# Altium footprint library FootPrintLib_8.PcbLib: 590 footprints (part 25 of 37)
Each footprint in its own frame and in the unit in brackets; x right, y up, seen from the top. Pads: shape width x height; smd on the part's side, far side on the other; paste and mask are expansions set on the pad; w line width, h text height; cw(c..) or ccw(c..) is an arc to the next point about the centre after c.
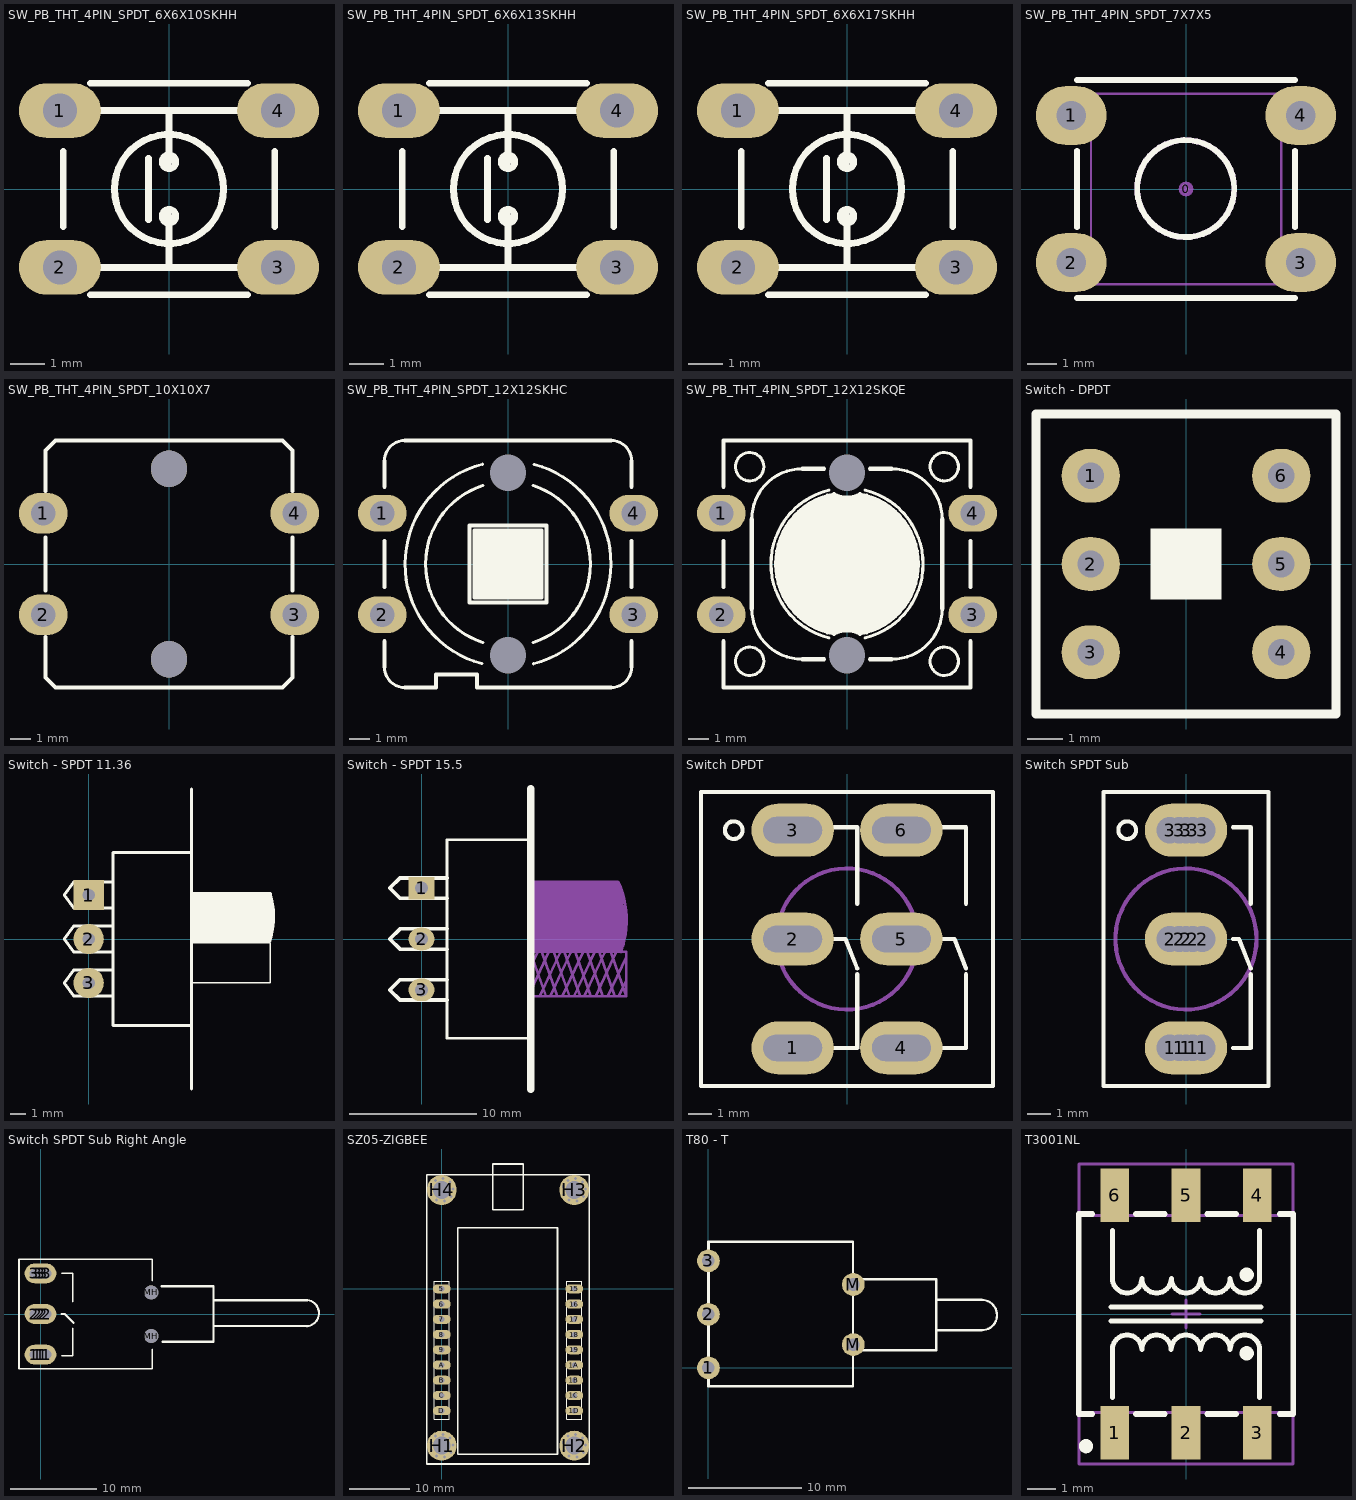
[diagram p24: the footprints below, top view; thin cyan lines are the x and y axes]

## SW_PB_THT_4PIN_SPDT_6X6X10SKHH [mm] "SWITCH, PUSHBUTTON, THD, SPDT, 6X6X9.5 mm Height ; 1,000,000 cycles ; 0.98N Force, SKHHANA010"
height 9.5
pads (4):
  oval 2.4x1.6 hole 1 mask+0.1: 1(-3.2,2.3) 2(-3.2,-2.3) 3(3.2,-2.3) 4(3.2,2.3)
Top Overlay:
  circle w0.2: c0,-0.8 r0.2
  circle w0.2: c0,0.8 r0.2
  circle w0.2: c0,0 r1.6
  lines w0.2: -3.1,-1.1 -3.1,1.1 ; -2.3,-3.1 2.3,-3.1 ; -2.3,3.1 2.3,3.1 ; -2,-2.3 2,-2.3 ; -2,2.3 2,2.3 ; -0.6,-0.9 -0.6,0.9 ; 0,-2.3 0,-0.8 ; 0,0.8 0,2.3 ; 3.1,-1.1 3.1,1.1
3D body "SKHHAN.STEP": height 9.53, standoff -3.47, extent -3.95,-3.1 3.95,3.1

## SW_PB_THT_4PIN_SPDT_6X6X13SKHH [mm] "SWITCH, PUSHBUTTON, THD, SPDT, 6X6X13.0 mm Height; 1,000,000 cycles ; 0.98N Force, SKHHDTA010"
height 13
pads (4):
  oval 2.4x1.6 hole 1 mask+0.1: 1(-3.2,2.3) 2(-3.2,-2.3) 3(3.2,-2.3) 4(3.2,2.3)
Top Overlay:
  circle w0.2: c0,0 r1.6
  circle w0.2: c0,0.8 r0.2
  circle w0.2: c0,-0.8 r0.2
  lines w0.2: -3.1,-1.1 -3.1,1.1 ; -2.3,-3.1 2.3,-3.1 ; -2.3,3.1 2.3,3.1 ; -2,-2.3 2,-2.3 ; -2,2.3 2,2.3 ; -0.6,-0.9 -0.6,0.9 ; 0,-2.3 0,-0.8 ; 0,0.8 0,2.3 ; 3.1,-1.1 3.1,1.1
3D body "SKHHDT.STEP": height 13.03, standoff -3.47, extent -3.95,-3.1 3.95,3.1

## SW_PB_THT_4PIN_SPDT_6X6X17SKHH [mm] "SWITCH, PUSHBUTTON, THD, SPDT, 6X6X17.0 mm Height ; 500,000 cycles ; 0.98N Force, SKHHDHA010"
height 17
pads (4):
  oval 2.4x1.6 hole 1 mask+0.1: 1(-3.2,2.3) 2(-3.2,-2.3) 3(3.2,-2.3) 4(3.2,2.3)
Top Overlay:
  circle w0.2: c0,0 r1.6
  circle w0.2: c0,0.8 r0.2
  circle w0.2: c0,-0.8 r0.2
  lines w0.2: -3.1,-1.1 -3.1,1.1 ; -2.3,-3.1 2.3,-3.1 ; -2.3,3.1 2.3,3.1 ; -2,-2.3 2,-2.3 ; -2,2.3 2,2.3 ; -0.6,-0.9 -0.6,0.9 ; 0,-2.3 0,-0.8 ; 0,0.8 0,2.3 ; 3.1,-1.1 3.1,1.1
3D body "SKHHDH.STEP": height 17.03, standoff -3.47, extent -3.95,-3.1 3.95,3.1

## SW_PB_THT_4PIN_SPDT_7X7X5 [mm] "SWITCH, PUSHBUTTON, THD, SPDT, 7.2X7.2mm, TC-37XB"
height 5
pads (5):
  round 0.508 on Mech15 mask+0.1: 0(0,0)
  oval 2.4x2 hole 1 mask+0.1: 1(-3.9,2.5) 2(-3.9,-2.5) 3(3.9,-2.5) 4(3.9,2.5)
Top Overlay:
  circle w0.2: c-0.011,0.014 r1.65
  lines w0.2: -3.7,-3.7 3.7,-3.7 ; -3.7,-1.3 -3.7,1.3 ; -3.7,3.7 3.7,3.7 ; 3.7,-1.3 3.7,1.3
Mechanical 13:
  circle w0.2: c-0.011,0.014 r1.65
  lines w0.076: -3.232,-3.237 -3.232,3.24 3.24,3.24 3.24,-3.237 -3.232,-3.237
3D body "TC-37XB.stp": height 5, standoff -3.9, extent -4.456,-3.6 4.456,3.6

## SW_PB_THT_4PIN_SPDT_10X10X7 [mm] "SWITCH, PUSHBUTTON, THD, SPDT,"
pads (6):
  oval 2.4x2 hole 1.2 mask+0.1: 1(-6.2,2.5) 2(-6.2,-2.5) 3(6.2,-2.5) 4(6.2,2.5)
  round 1.8 hole 1.8 unplated: ""(0,-4.7) ""(0,4.7)
Top Overlay:
  lines w0.2: -6.1,-3.6 -6.1,-5.6 -5.6,-6.1 5.6,-6.1 6.1,-5.6 6.1,-3.6 ; -6.1,-1.3 -6.1,1.3 ; -6.1,3.6 -6.1,5.6 -5.6,6.1 5.6,6.1 6.1,5.6 6.1,3.6 ; 6.1,-1.3 6.1,1.3
3D body "User Library-SWT9-1.STEP": height 7.3, standoff -3.5, extent -6.5,-6 6.5,6

## SW_PB_THT_4PIN_SPDT_12X12SKHC [mm] "SWITCH, PUSHBUTTON, THD, SPDT, 12X12X7.3 mm ; 1,000,000 cycles ; 1.27N Force, SKHCBEA010"
height 7.3
pads (6):
  oval 2.4x1.8 hole 1.2 mask+0.1: 1(-6.2,2.5) 2(-6.2,-2.5) 3(6.2,-2.5) 4(6.2,2.5)
  round 0 hole 1.8 unplated mask+0.1: ""(0,-4.5) ""(0,4.5)
Top Overlay:
  region: -1.651,-1.651 -1.651,1.651 1.651,1.651 1.651,-1.651
  lines w0.152: -6.096,-5.08 ccw(c-5.08,-5.08) -5.08,-6.096 ; -6.096,5.08 cw(c-5.08,5.08) -5.08,6.096 ; -1.293,-4.913 cw(c0,0) -1.262,4.921 ; -1.248,-3.868 cw(c0,0) -1.248,3.868 ; 1.248,-3.868 ccw(c0,0) 1.248,3.868 ; 1.262,-4.921 ccw(c0,0) 1.293,4.913 ; 5.08,-6.096 ccw(c5.08,-5.08) 6.096,-5.08 ; 5.08,6.096 cw(c5.08,5.08) 6.096,5.08
  lines w0.2: -6.096,-5.08 -6.096,-3.81 ; -6.096,-1.143 -6.096,1.143 ; -6.096,3.81 -6.096,5.08 ; -5.08,-6.096 -3.556,-6.096 -3.556,-5.461 -1.524,-5.461 -1.524,-6.096 5.08,-6.096 ; -5.08,6.096 5.08,6.096 ; 6.096,-5.08 6.096,-3.81 ; 6.096,-1.143 6.096,1.143 ; 6.096,3.81 6.096,5.08 ; -1.905,-1.905 -1.905,1.905 1.905,1.905 1.905,-1.905 -1.905,-1.905 ; -1.651,-1.651 -1.651,1.651 1.651,1.651 1.651,-1.651 -1.651,-1.651
3D body "SKHCBJ.STEP": height 7.33, standoff -3.47, extent -7,-6 7,6

## SW_PB_THT_4PIN_SPDT_12X12SKQE [mm] "SWITCH, PUSHBUTTON, THD, SPDT, 12X12X4.3 mm ; 10,000,000 cycles ; 1.57N Force, SKQEABA010"
height 4.3
pads (6):
  oval 2.4x1.8 hole 1.2 mask+0.1: 1(-6.2,2.5) 2(-6.2,-2.5) 3(6.2,-2.5) 4(6.2,2.5)
  round 0 hole 1.8 unplated mask+0.1: ""(0,-4.5) ""(0,4.5)
Top Overlay:
  circle w0.152: c4.8,-4.8 r0.7
  circle w0.152: c-4.8,-4.8 r0.7
  circle w0.152: c-4.8,4.8 r0.7
  circle w0.152: c4.8,4.8 r0.7
  region: -0.637,-3.441 -0.876,-3.397 -1.338,-3.243 -1.774,-3.027 -2.175,-2.753 -2.535,-2.425 -2.846,-2.051 -3.103,-1.638 -3.299,-1.193 -3.433,-0.725 -3.5,-0.243 -3.5,0.243 -3.433,0.725 -3.299,1.193 -3.103,1.638 -2.846,2.051 -2.535,2.425 -2.175,2.753 -1.774,3.027 -1.338,3.243 -0.876,3.397 -0.637,3.441 -0.488,3.365 -0.167,3.276 0.167,3.276 0.488,3.365 0.637,3.441 0.876,3.397 1.338,3.243 1.774,3.027 2.175,2.753 2.535,2.425 2.846,2.051 3.103,1.638 3.299,1.193 3.433,0.725 3.5,0.243 3.5,-0.243 3.433,-0.725 3.299,-1.193 3.103,-1.638 2.846,-2.051 2.535,-2.425 2.175,-2.753 1.774,-3.027 1.338,-3.243 0.876,-3.397 0.637,-3.441 0.488,-3.365 0.167,-3.276 -0.167,-3.276 -0.488,-3.365
  lines w0.152: -4.7,-2.2 ccw(c-2.2,-2.2) -2.2,-4.7 ; -4.7,2.2 cw(c-2.2,2.2) -2.2,4.7 ; -0.88,-3.645 cw(c0,0) -0.88,3.645 ; 0.88,-3.645 ccw(c0,0) 0.88,3.645 ; 2.2,-4.7 ccw(c2.2,-2.2) 4.7,-2.2 ; 2.2,4.7 cw(c2.2,2.2) 4.7,2.2
  lines w0.2: -6.096,-3.81 -6.096,-6.096 6.096,-6.096 6.096,-3.81 ; -6.096,-1.143 -6.096,1.143 ; -6.096,3.81 -6.096,6.096 6.096,6.096 6.096,3.81 ; -4.7,-2.2 -4.7,2.2 ; -2.2,-4.7 -1.143,-4.7 ; -2.2,4.7 -1.143,4.7 ; 1.143,-4.7 2.2,-4.7 ; 1.143,4.7 2.2,4.7 ; 4.7,-2.2 4.7,2.2 ; 6.096,-1.143 6.096,1.143 ; -0.637,-3.441 cw(c0,-4.5) 0.637,-3.441 ccw(c0,0) 0.637,3.441 cw(c0,4.5) -0.637,3.441 ccw(c0,0) -0.637,-3.441
3D body "SKQEAB.STEP": height 4.33, standoff -3.47, extent -7,-6 7,6

## Switch - DPDT [mil]
pads (6):
  oval 65x60 hole 30: 1(-106.3,98.43) 2(-106.3,0) 3(-106.3,-98.43) 4(106.3,-98.43) 5(106.3,0) 6(106.3,98.43)
Top Overlay:
  rectangle: -39.37,-39.37 39.37,39.37
  lines w10: -167.32,-167.32 -167.32,167.32 167.32,167.32 167.32,-167.32 -167.32,-167.32
3D body "DPDT.STEP": height 559.06, standoff -129.92, extent -167.32,-167.32 167.32,167.32

## Switch - SPDT 11.36 [mm]
pads (3):
  rect 2x2 hole 0.8: 1(0,2.9)
  round 2 hole 0.8: 2(0,0) 3(0,-2.9)
Top Overlay:
  rectangle: 6.8,-0.2 11.982,2.998
  lines w0.1: 6.8,-2.9 11.99,-2.9 11.99,-0.282
  lines w0.2: 1.6,-3.75 -1,-3.75 -1.6,-2.9 -1,-2.05 1.6,-2.05 ; 1.6,-0.85 -1,-0.85 -1.6,0 -1,0.85 1.6,0.85 ; 1.6,2.05 -1,2.05 -1.6,2.9 -1,3.75 1.6,3.75 ; 6.8,-9.9 6.8,9.9 ; 6.8,-5.7 1.6,-5.7 1.6,5.7 6.8,5.7 ; 6.8,-0.2 11.932,-0.201 ccw(c6.8,1.48) 11.982,2.998 6.8,3
  lines w0.3: 12.01,0.47 12.01,2.5

## Switch - SPDT 15.5 [mil]
pads (3):
  rect 80x70 hole 40: 1(0,157.48)
  oval 80x70 hole 40: 2(0,0) 3(0,-157.48)
Top Overlay:
  lines w7.87: 338.58,-307.09 78.74,-307.09 78.74,307.09 338.58,307.09
  lines w11.81: 78.74,-188.98 -66.93,-188.98 -98.43,-157.48 -66.93,-125.98 78.74,-125.98 ; 78.74,-31.5 -66.93,-31.5 -98.43,0 -66.93,31.5 78.74,31.5 ; 78.74,125.98 -66.93,125.98 -98.43,157.48 -66.93,188.98 78.74,188.98
  lines w23.62: 338.58,-464.57 338.58,464.57
Mechanical 3:
  rectangle: 607.87,-23.62 622.44,-9.06
  rectangle: 596.06,158.66 612.6,168.11
  rectangle: 596.06,135.83 619.68,164.17
  rectangle: 596.06,105.51 624.41,135.83
  rectangle: 617.04,-14.17 627.56,22.44
  rectangle: 596.06,-40.38 617.04,12.2
  rectangle: 596.06,12.2 631.5,105.51
  rectangle: 338.58,-39.37 607.48,177.17
  lines w7.87: 331.5,-174.02 394.09,-39.37 ; 337.01,-39.37 385.43,-177.17 ; 338.58,-177.17 633.86,-177.17 ; 338.58,-83.86 359.45,-39.37 ; 338.58,-39.37 633.86,-39.37 633.86,-177.17 ; 338.58,177.17 607.48,177.17 ; 366.14,-177.17 428.74,-42.52 ; 371.65,-39.37 420.08,-177.17 ; 398.82,-177.17 461.42,-42.52 ; 409.84,-39.37 458.27,-177.17 ; 436.22,-177.17 498.82,-42.52 ; 442.52,-39.37 490.94,-177.17 ; 472.05,-177.17 534.65,-42.52 ; 475.98,-39.37 524.41,-177.17 ; 503.94,-177.17 566.54,-42.52 ; 512.99,-39.37 561.42,-177.17 ; 538.98,-177.17 601.57,-42.52 ; 550.39,-39.37 598.82,-177.17 ; 577.17,-177.17 633.86,-56.69 ; 585.43,-39.37 633.86,-177.17 ; 611.02,-177.17 633.86,-128.35
  lines w10: 608.82,176.89 cw(c338.58,57.87) 617.36,-39.48
3D body "spdt.STEP": height 356.3, standoff -157.48, extent -68.5,-462.01 659.84,462.01

## Switch DPDT [mil]
pads (6):
  oval 140x90 hole 45 slot 100 at 0 deg: 1(-92.5,-185) 2(-92.5,0) 3(-92.5,185) 4(92.5,-185) 5(92.5,0) 6(92.5,185)
Top Overlay:
  circle w7: c-192.5,185 r15
  lines w7: -42.5,0 -2.5,0 17.5,-50 ; -27.5,190 17.5,190 17.5,60 ; -22.5,-185 17.5,-185 17.5,-60 ; 142.5,0 182.5,0 202.5,-50 ; 157.5,190 202.5,190 202.5,60 ; 162.5,-185 202.5,-185 202.5,-60 ; -248,-250 -248,250 248,250 248,-250 -248,-250
Mechanical 1:
  circle w7: c0,0 r120
3D body "SWITCH DPDT.STEP": height 1121.73, standoff -100, extent -246.5,-250 248.5,250

## Switch SPDT Sub [mil]
pads (15):
  round 40 hole 45: 1(-27.56,-185.04) 1(-11.81,-185.04) 1(11.81,-185.04) 1(27.56,-185.04) 2(-27.56,0) 2(-11.81,0) 2(11.81,0) 2(27.56,0) 3(-27.56,185.04) 3(-11.81,185.04) 3(11.81,185.04) 3(27.56,185.04)
  oval 140x90 hole 45: 1(0,-185) 2(0,0) 3(0,185)
Top Overlay:
  circle w7: c-100,185 r15
  lines w7: 79.72,-185 110,-185 110,-60 ; 79.72,0 90,0 110,-50 ; 79.72,190 110,190 110,60 ; -140,-250 140,-250 140,250 -140,250 -140,-250
Mechanical 1:
  circle w7: c0,0 r120
3D body "SWITCH SPDT.STEP": height 1126.73, standoff -95, extent -134.47,-250 135.53,250

## Switch SPDT Sub Right Angle [mil]
pads (17):
  round 90 hole 45: 1(-27.56,-185.04) 1(-11.81,-185.04) 1(11.81,-185.04) 1(27.56,-185.04) 2(-27.56,0) 2(-11.81,0) 2(11.81,0) 2(27.56,0) 3(-27.56,185.04) 3(-11.81,185.04) 3(11.81,185.04) 3(27.56,185.04)
  oval 140x90 hole 45: 1(0,-185) 2(0,0) 3(0,185)
  round 63 hole 65: MH(503.94,-100.36) MH(503.94,98.43)
Top Overlay:
  lines w7: 96,-190 147,-190 147,-65 ; 97,185 147,185 147,55 ; 507.87,-160 507.87,-250 -98,-250 -98,250 507.87,250 507.87,151
  lines w10: 96,0 110,0 150,-40 ; 551,125.98 787.4,125.98 787.4,-125.98 555,-125.98 ; 787.4,62.99 1216.54,62.99 cw(c1208.66,3.94) 1213.81,-55.42 ; 791.34,-55.12 1213.78,-55.12
3D body "SW3dPS-Switch toggle NKK M2012SA2W30.STEP": height 317.31, standoff -164.5, extent -22.64,-256 1269.05,256

## SZ05-ZIGBEE [mm] "SZ05-ZIGBEE"
pads (22):
  oval 3x1.5 hole 0.9: 1A(22.098,-12.7) 1B(22.098,-15.24) 1C(22.098,-17.78) 1D(22.098,-20.32) 5(0,0) 6(0,-2.54) 7(0,-5.08) 8(0,-7.62) 9(0,-10.16) 15(22.098,0) 16(22.098,-2.54) 17(22.098,-5.08) 18(22.098,-7.62) 19(22.098,-10.16) A(0,-12.7) B(0,-15.24) C(0,-17.78) D(0,-20.32)
  round 5 hole 3: H1(0,-26.162) H2(22.098,-26.162) H3(22.098,16.51) H4(0,16.51)
via 1.905,16.637 diameter 0.7 hole 0.5
via 1.378,17.832 diameter 0.7 hole 0.5
via 0.206,18.408 diameter 0.7 hole 0.5
via -1.062,18.096 diameter 0.7 hole 0.5
via -0.843,14.797 diameter 0.7 hole 0.5
via 0.456,14.656 diameter 0.7 hole 0.5
via 1.541,15.383 diameter 0.7 hole 0.5
via -1.747,15.739 diameter 0.7 hole 0.5
via -1.834,17.042 diameter 0.7 hole 0.5
via 24.003,16.637 diameter 0.7 hole 0.5
via 23.476,17.832 diameter 0.7 hole 0.5
via 22.304,18.408 diameter 0.7 hole 0.5
via 21.036,18.096 diameter 0.7 hole 0.5
via 21.255,14.797 diameter 0.7 hole 0.5
via 22.554,14.656 diameter 0.7 hole 0.5
via 23.639,15.383 diameter 0.7 hole 0.5
via 20.351,15.739 diameter 0.7 hole 0.5
via 20.264,17.042 diameter 0.7 hole 0.5
via 24.003,-26.035 diameter 0.7 hole 0.5
via 23.476,-24.84 diameter 0.7 hole 0.5
via 22.304,-24.264 diameter 0.7 hole 0.5
via 21.036,-24.576 diameter 0.7 hole 0.5
via 21.255,-27.875 diameter 0.7 hole 0.5
via 22.554,-28.016 diameter 0.7 hole 0.5
via 23.639,-27.289 diameter 0.7 hole 0.5
via 20.351,-26.933 diameter 0.7 hole 0.5
via 20.264,-25.63 diameter 0.7 hole 0.5
via 1.905,-26.035 diameter 0.7 hole 0.5
via 1.378,-24.84 diameter 0.7 hole 0.5
via 0.206,-24.264 diameter 0.7 hole 0.5
via -1.062,-24.576 diameter 0.7 hole 0.5
via -0.843,-27.875 diameter 0.7 hole 0.5
via 0.456,-28.016 diameter 0.7 hole 0.5
via 1.541,-27.289 diameter 0.7 hole 0.5
via -1.747,-26.933 diameter 0.7 hole 0.5
via -1.834,-25.63 diameter 0.7 hole 0.5
Top Overlay:
  lines w0.2: -1.27,-21.717 -1.27,1.27 1.27,1.27 1.27,-0.635 1.27,-21.717 -1.27,-21.717 ; 20.828,-21.717 23.368,-21.717 23.368,-0.635 23.368,1.27 20.828,1.27 20.828,-21.717
  lines w0.254: -2.54,-29.21 -2.54,19.05 24.638,19.05 24.638,-29.21 -2.54,-29.21 ; 2.667,-27.559 2.667,-5.842 2.667,10.16 19.304,10.16 19.304,-5.715 19.304,-27.559 2.667,-27.559 ; 8.509,13.208 13.589,13.208 13.589,20.828 8.509,20.828 8.509,13.208

## T80 - T [mm] "Switch; 4 Leads"
pads (5):
  round 2 hole 1.1: 1(0,0) 2(0,4.699) 3(0,9.398) M(12.725,2.032) M(12.725,7.315)
Top Overlay:
  lines w0.2: 0,-1.626 12.7,-1.626 12.7,11.074 0,11.074 ; 12.7,1.549 20.015,1.549 20.015,7.772 12.7,7.772 ; 20.015,3.302 24.028,3.302 ccw(c24.028,4.623) 25.349,4.623 ccw(c24.003,4.623) 24.003,5.969 20.015,5.969
  lines w0.254: 0,-1.626 0,11.074

## T3001NL [mil] "T3001NL"
height 250
pads (6):
  rect 40x75 smd: 1(-100,-166.5) 2(0,-166.5) 3(100,-166.5) 4(100,166.5) 5(0,166.5) 6(-100,166.5)
Top Overlay:
  circle w10: c-140,-185 r5
  circle w10: c85,-55 r5
  circle w10: c85,55 r5
  lines w7: -105,-10 105,-10 ; -105,10 105,10 ; -103.16,-116.84 -103.16,-50 cw(c-82.54,-50) -61.92,-50 cw(c-41.31,-50) -20.69,-50 cw(c-0.08,-50) 20.54,-50 cw(c41.15,-50) 61.77,-50 cw(c82.38,-50) 103,-50 103,-116.84 ; -103,116.84 -103,50 ccw(c-82.38,50) -61.77,50 ccw(c-41.15,50) -20.54,50 ccw(c0.08,50) 20.69,50 ccw(c41.31,50) 61.92,50 ccw(c82.54,50) 103.16,50 103.16,116.84
  lines w7.87: -131.25,-140 -150,-140 -150,140 -131.25,140 ; -70,-140 -30,-140 ; -70,140 -30,140 ; 30,-140 70,-140 ; 30,140 70,140 ; 131.25,-140 150,-140 150,140 131.25,140
Mechanical 13:
  lines w3.94: -150,-137.8 150,-137.8 150,137.8 -150,137.8 -150,-137.8
Mechanical 15:
  lines w3.94: -19.69,0 19.69,0 ; 0,-19.69 0,19.69 ; -150,-210 150,-210 150,210 -150,210 -150,-210
3D body: height 250, standoff 0, extent -150,-137.8 150,137.8